# Altium footprint library PCB - INDUCTANCES - SMD - SER2918H333KL.PcbLib: 1 footprints
Each footprint in its own frame and in the unit in brackets; x right, y up, seen from the top. Pads: shape width x height; smd on the part's side, far side on the other; paste and mask are expansions set on the pad; w line width, h text height; cw(c..) or ccw(c..) is an arc to the next point about the centre after c.
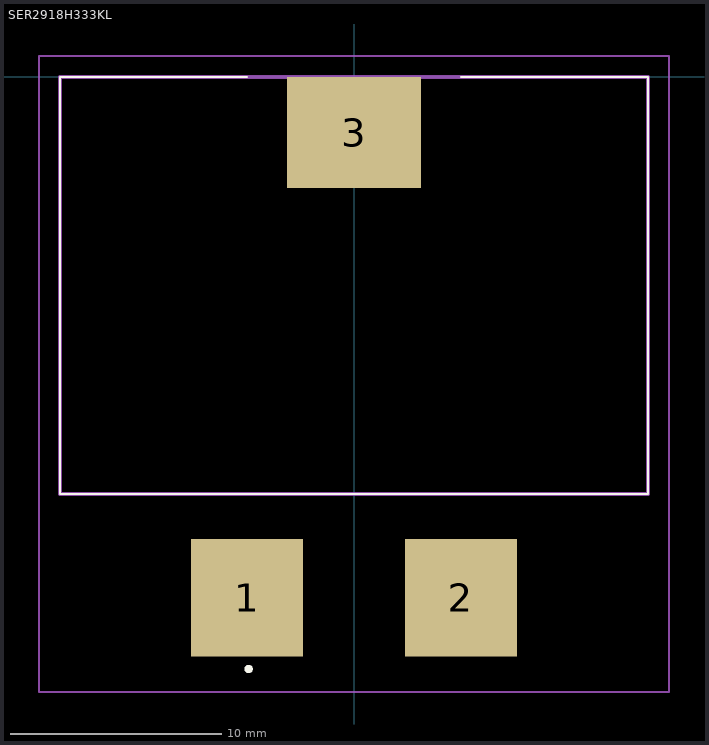
[diagram p0: the footprint, top view; thin cyan lines are the x and y axes]

## SER2918H333KL [mm]
pads (3):
  rect 5.33x5.59 smd: 1(-5.075,-24.715) 2(5.075,-24.715)
  rect 6.35x5.28 smd: 3(0,-2.64)
Top Overlay:
  lines w0.1: -5.075,0 -13.95,0 -13.95,-19.8 13.95,-19.8 13.95,0 5.075,0
  lines w0.2: -5.1,-28.1 ccw(c-5,-28.1) -4.9,-28.1 ccw(c-5,-28.1) -5.1,-28.1
Top Value (Mech13):
  lines w0.2: -13.95,-19.8 -13.95,0 13.95,0 13.95,-19.8 -13.95,-19.8
Mechanical 15:
  lines w0.1: -14.95,-29.2 -14.95,1 14.95,1 14.95,-29.2 -14.95,-29.2
3D body "SER2918H-153KL.stp": height 15.59, standoff 0.23, extent -14.121,-27.061 13.781,-0.02